# Altium schematic symbol library CD4052BM (2).SchLib: 1 symbol
Pins are listed as number, name and electrical type; pins without a type are passive.

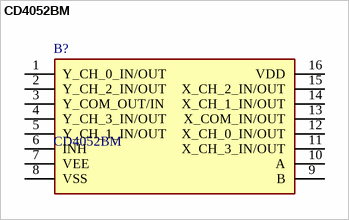
[diagram p0: symbol CD4052BM]

## CD4052BM
designator B?
CMOS Differential 4-Channel Analog Multiplexer/Demultiplexer with Logic-Level Conversion; Manufacturer_Name: Texas Instruments; Geometry.Height: 1.75mm; Manufacturer_Part_Number: CD4052BM; Mouser Part Number: 595-CD4052BM; Mouser Price/Stock: https://www.mouser.co.uk/ProductDetail/Texas-Instruments/CD4052BM?qs=LSR%252BNeaw%2FwAMfT6cddU6yA%3D%3D; Arrow Part Number: CD4052BM; Arrow Price/Stock: https://www.arrow.com/en/products/cd4052bm/texas-instruments?region=nac; Datasheet Link: http://www.ti.com/lit/ds/symlink/cd4052b.pdf
footprint SOIC127P600X175-16N
pins: 1 Y_CH_0_IN/OUT, 2 Y_CH_2_IN/OUT, 3 Y_COM_OUT/IN, 4 Y_CH_3_IN/OUT, 5 Y_CH_1_IN/OUT, 6 INH, 7 VEE, 8 VSS, 9 B, 10 A, 11 X_CH_3_IN/OUT, 12 X_CH_0_IN/OUT, 13 X_COM_IN/OUT, 14 X_CH_1_IN/OUT, 15 X_CH_2_IN/OUT, 16 VDD